# Altium footprint library PM.PcbLib: 38 footprints (part 1 of 3)
Each footprint in its own frame and in the unit in brackets; x right, y up, seen from the top. Pads: shape width x height; smd on the part's side, far side on the other; paste and mask are expansions set on the pad; w line width, h text height; cw(c..) or ccw(c..) is an arc to the next point about the centre after c.
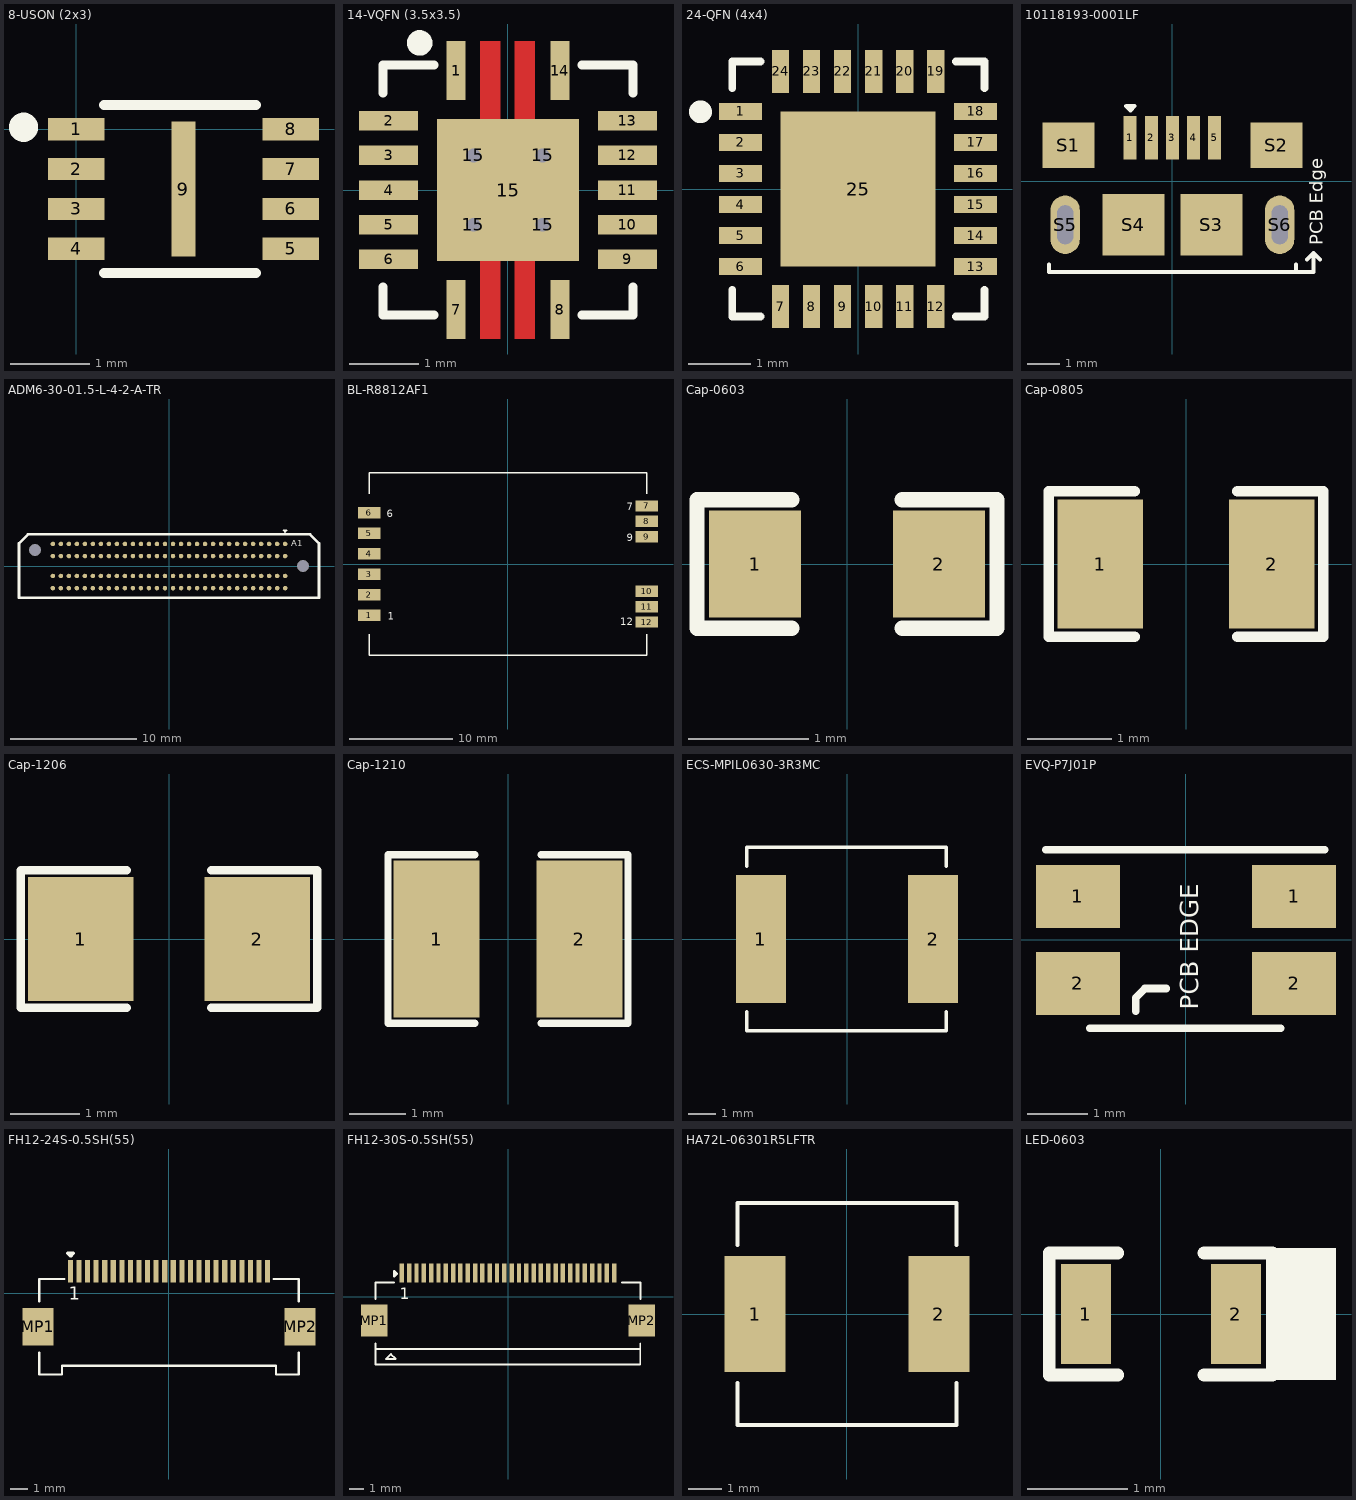
[diagram p0: the footprints below, top view; thin cyan lines are the x and y axes]

## 8-USON (2x3) [mm]
pads (9):
  rect 0.711x0.28 smd: 1(0,0) 2(0,-0.5) 3(0,-1) 4(0,-1.5) 5(2.695,-1.5) 6(2.695,-1) 7(2.695,-0.5) 8(2.695,0)
  rect 0.3x1.7 smd: 9(1.348,-0.75)
Top Overlay:
  circle w0.254: c-0.66,0.025 r0.057
  lines w0.127: 0.352,-1.805 2.257,-1.805 ; 0.352,0.305 2.257,0.305
3D body "step_temp.STEP": height 0.6, standoff 0, extent -0.152,-1.75 2.848,0.25

## 14-VQFN (3.5x3.5) [mm]
pads (19):
  rect 0.28x0.85 smd: 1(-0.75,1.725) 7(-0.75,-1.725) 8(0.75,-1.725) 14(0.75,1.725)
  rect 0.85x0.28 smd: 2(-1.725,1) 3(-1.725,0.5) 4(-1.725,0) 5(-1.725,-0.5) 6(-1.725,-1) 9(1.725,-1) 10(1.725,-0.5) 11(1.725,0) 12(1.725,0.5) 13(1.725,1)
  round 0.4 hole 0.2 mask+0: 15(-0.5,-0.5) 15(-0.5,0.5) 15(0.5,-0.5) 15(0.5,0.5)
  rect 2.05x2.05 smd: 15(0,0)
Top Layer:
  region: -0.11,0.949 -0.11,2.149 -0.403,2.149 -0.403,0.949
  region: 0.39,0.949 0.39,2.149 0.097,2.149 0.097,0.949
  region: -0.403,-0.949 -0.403,-2.149 -0.11,-2.149 -0.11,-0.949
  region: 0.097,-0.949 0.097,-2.149 0.39,-2.149 0.39,-0.949
Top Overlay:
  circle w0.254: c-1.275,2.124 r0.057
  lines w0.127: -1.803,-1.397 -1.803,-1.803 -1.067,-1.803 ; -1.803,1.397 -1.803,1.803 -1.067,1.803 ; 1.067,-1.803 1.803,-1.803 1.803,-1.397 ; 1.067,1.803 1.803,1.803 1.803,1.397
3D body "RHL0014A.stp": height 1, standoff 0, extent -1.75,-1.75 1.75,1.75

## 24-QFN (4x4) [mm]
pads (25):
  rect 0.69x0.28 smd: 1(-1.895,1.25) 2(-1.895,0.75) 3(-1.895,0.25) 4(-1.895,-0.25) 5(-1.895,-0.75) 6(-1.895,-1.25) 13(1.895,-1.25) 14(1.895,-0.75) 15(1.895,-0.25) 16(1.895,0.25) 17(1.895,0.75) 18(1.895,1.25)
  rect 0.28x0.69 smd: 7(-1.25,-1.895) 8(-0.75,-1.895) 9(-0.25,-1.895) 10(0.25,-1.895) 11(0.75,-1.895) 12(1.25,-1.895) 19(1.25,1.895) 20(0.75,1.895) 21(0.25,1.895) 22(-0.25,1.895) 23(-0.75,1.895) 24(-1.25,1.895)
  rect 2.5x2.5 smd: 25(0,0)
Top Overlay:
  circle w0.254: c-2.54,1.245 r0.057
  lines w0.127: -2.028,-1.626 -2.028,-2.057 -1.571,-2.057 ; -2.028,1.626 -2.028,2.057 -1.571,2.057 ; 1.579,-2.057 2.036,-2.057 2.036,-1.626 ; 1.579,2.057 2.036,2.057 2.036,1.626
3D body "CP2102N-A02-GQFN24R--3DModel-STEP-56544.STEP": height 0.8, standoff 0, extent -2,-2 2,2

## 10118193-0001LF [mm]
pads (11):
  rect 0.4x1.35 smd: 1(-1.3,1.338) 2(-0.65,1.338) 3(0,1.338) 4(0.65,1.338) 5(1.3,1.338)
  rect 1.6x1.4 smd: S1(-3.2,1.112) S2(3.2,1.112)
  rect 1.9x1.9 smd: S3(1.2,-1.338) S4(-1.2,-1.338)
  oval 0.9x1.8 hole 0.5 slot 1.2 at 90 deg: S5(-3.3,-1.338) S6(3.3,-1.338)
Top Overlay:
  lines w0.127: -3.8,-2.558 -3.8,-2.788 3.8,-2.788 ; 3.8,-2.558 3.8,-2.788 ; 4.142,-2.404 4.343,-2.203 ; 4.544,-2.404 4.343,-2.203 ; 3.8,-2.788 4.343,-2.788 4.343,-2.203 ; -1.422,2.311 -1.168,2.311 -1.295,2.184 -1.422,2.311
  text "PCB Edge" at 4.625,-1.973 h0.41
3D body "step_temp.STEP": height 2.78, standoff -0.82, extent -3.928,-4.166 3.928,1.495

## ADM6-30-01.5-L-4-2-A-TR [mm]
pads (122):
  round 0.356 smd: A01(9.207,1.75) A02(8.572,1.75) A03(7.938,1.75) A04(7.302,1.75) A05(6.667,1.75) A06(6.032,1.75) A07(5.397,1.75) A08(4.763,1.75) A09(4.127,1.75) A10(3.492,1.75) A11(2.857,1.75) A12(2.222,1.75) A13(1.587,1.75) A14(0.953,1.75) A15(0.318,1.75) A16(-0.318,1.75) A17(-0.953,1.75) A18(-1.587,1.75) A19(-2.222,1.75) A20(-2.857,1.75) A21(-3.492,1.75) A22(-4.127,1.75) A23(-4.763,1.75) A24(-5.397,1.75) A25(-6.032,1.75) A26(-6.667,1.75) A27(-7.302,1.75) A28(-7.938,1.75) A29(-8.572,1.75) A30(-9.207,1.75) B01(9.207,0.79) B02(8.572,0.79) B03(7.938,0.79) B04(7.302,0.79) B05(6.667,0.79) B06(6.032,0.79) B07(5.397,0.79) B08(4.763,0.79) B09(4.127,0.79) B10(3.492,0.79) B11(2.857,0.79) B12(2.222,0.79) B13(1.587,0.79) B14(0.953,0.79) B15(0.318,0.79) B16(-0.318,0.79) B17(-0.953,0.79) B18(-1.587,0.79) B19(-2.222,0.79) B20(-2.857,0.79) B21(-3.492,0.79) B22(-4.127,0.79) B23(-4.763,0.79) B24(-5.397,0.79) B25(-6.032,0.79) B26(-6.667,0.79) B27(-7.302,0.79) B28(-7.938,0.79) B29(-8.572,0.79) B30(-9.207,0.79) C01(9.207,-0.79) C02(8.572,-0.79) C03(7.938,-0.79) C04(7.302,-0.79) C05(6.667,-0.79) C06(6.032,-0.79) C07(5.397,-0.79) C08(4.763,-0.79) C09(4.127,-0.79) C10(3.492,-0.79) C11(2.857,-0.79) C12(2.222,-0.79) C13(1.587,-0.79) C14(0.953,-0.79) C15(0.318,-0.79) C16(-0.318,-0.79) C17(-0.953,-0.79) C18(-1.587,-0.79) C19(-2.222,-0.79) C20(-2.857,-0.79) C21(-3.492,-0.79) C22(-4.127,-0.79) C23(-4.763,-0.79) C24(-5.397,-0.79) C25(-6.032,-0.79) C26(-6.667,-0.79) C27(-7.302,-0.79) C28(-7.938,-0.79) C29(-8.572,-0.79) C30(-9.207,-0.79) D01(9.207,-1.75) D02(8.572,-1.75) D03(7.938,-1.75) D04(7.302,-1.75) D05(6.667,-1.75) D06(6.032,-1.75) D07(5.397,-1.75) D08(4.763,-1.75) D09(4.127,-1.75) D10(3.492,-1.75) D11(2.857,-1.75) D12(2.222,-1.75) D13(1.587,-1.75) D14(0.953,-1.75) D15(0.318,-1.75) D16(-0.318,-1.75) D17(-0.953,-1.75) D18(-1.587,-1.75) D19(-2.222,-1.75) D20(-2.857,-1.75) D21(-3.492,-1.75) D22(-4.127,-1.75) D23(-4.763,-1.75) D24(-5.397,-1.75) D25(-6.032,-1.75) D26(-6.667,-1.75) D27(-7.302,-1.75) D28(-7.938,-1.75) D29(-8.572,-1.75) D30(-9.207,-1.75)
  round 0 hole 0.95 unplated: ""(-10.61,1.27) ""(10.61,0)
Top Overlay:
  lines w0.127: 9.068,2.819 9.195,2.692 9.322,2.819 9.068,2.819
  lines w0.2: -11.885,-2.5 -11.885,1.793 -11.178,2.5 11.178,2.5 11.885,1.793 11.885,-2.5 -11.885,-2.5
  text "A1" at 9.677,1.575 h0.5
3D body "ADM6-30-01.5-L-4-2-A.step": height 4.1, standoff -0.67, extent -11.885,-2.489 11.885,2.511

## BL-R8812AF1 [mm]
pads (12):
  rect 2.2x1.1 smd: 1(-13.5,-5) 2(-13.5,-3) 3(-13.5,-1) 4(-13.5,1) 5(-13.5,3) 6(-13.5,5) 7(13.5,5.65) 8(13.5,4.15) 9(13.5,2.65) 10(13.5,-2.65) 11(13.5,-4.15) 12(13.5,-5.65)
Top Overlay:
  lines w0.127: -13.5,-6.846 -13.5,-8.9 13.5,-8.9 13.5,-6.846 ; -13.5,6.846 -13.5,8.9 13.5,8.9 13.5,6.846
  text "12" at 10.909,-5.962 h0.7
  text "9" at 11.57,2.236 h0.7
  text "7" at 11.57,5.236 h0.7
  text "6" at -11.798,4.568 h0.7
  text "1" at -11.697,-5.432 h0.7
3D body "BL-R8812AF1 RTL8812AU.STEP": height 2.09, standoff 0.03, extent -13.5,-8.91 13.5,8.89

## Cap-0603 [mil]
pads (2):
  rect 30x35 smd mask+2.36: 1(-30,0) 2(30,0)
Top Overlay:
  lines w5: -18,-21 -49,-21 -49,21 -18,21 ; 18,-21 49,-21 49,21 18,21
3D body "User Library-CAPC1608X09.step": height 34.25, standoff -1.18, extent -31.51,-15.75 31.49,15.74

## Cap-0805 [mil] "SMD 0805"
pads (2):
  rect 40x60 smd mask+2.76: 1(-40,0) 2(40,0)
Top Overlay:
  lines w5: -24,-34 -64,-34 -64,34 -24,34 ; 24,-34 64,-34 64,34 24,34
3D body "User Library-0805 SMD Capacitor.step": height 30, standoff -0.79, extent -39.36,-24.6 39.38,24.61

## Cap-1206 [mil] "SMD 1206"
pads (2):
  rect 60x70 smd: 1(-50,0) 2(50,0)
Top Overlay:
  lines w5: -24,-39 -84,-39 -84,39 -24,39 ; 24,-39 84,-39 84,39 24,39
3D body "User Library-1206 SMD Capacitor.step": height 39.45, standoff 0, extent -62.96,-31.46 63.03,31.53

## Cap-1210 [mil] "SMD 1210"
pads (2):
  rect 60x110 smd: 1(-50,0) 2(50,0)
Top Overlay:
  lines w5: -23,-59 -84,-59 -84,59 -23,59 ; 23,-59 84,-59 84,59 23,59
3D body "User Library-CAPC3225X10.step": height 39.37, standoff 0, extent -62.99,-49.21 63,49.22

## ECS-MPIL0630-3R3MC [mm]
pads (2):
  rect 1.8x4.6 smd: 1(-3.1,0) 2(3.1,0)
Top Overlay:
  lines w0.127: -3.605,-2.62 -3.605,-3.3 3.579,-3.3 3.579,-2.62 ; -3.605,2.62 -3.605,3.3 3.579,3.3 3.579,2.62
3D body "step_temp.STEP": height 3, standoff 0, extent -3.55,-3.3 3.55,3.3

## EVQ-P7J01P [mm]
pads (4):
  rect 1.4x1.05 smd: 1(-1.8,0.725) 1(1.8,0.725) 2(-1.8,-0.725) 2(1.8,-0.725)
Top Overlay:
  lines w0.127: -2.337,1.499 2.311,1.499 ; -1.6,-1.473 1.575,-1.473 ; -0.838,-1.194 -0.838,-0.965 -0.686,-0.813 -0.33,-0.813
  text "PCB EDGE" at 0.205,-1.17 h0.3
3D body "EVQ-P7J01P--3DModel-STEP-269445-2.step": height 1.35, standoff 0, extent -2.35,-2.1 2.35,1.45

## FH12-24S-0.5SH(55) [mm]
pads (26):
  rect 0.3x1.3 smd: 1(-5.75,1.3) 2(-5.25,1.3) 3(-4.75,1.3) 4(-4.25,1.3) 5(-3.75,1.3) 6(-3.25,1.3) 7(-2.75,1.3) 8(-2.25,1.3) 9(-1.75,1.3) 10(-1.25,1.3) 11(-0.75,1.3) 12(-0.25,1.3) 13(0.25,1.3) 14(0.75,1.3) 15(1.25,1.3) 16(1.75,1.3) 17(2.25,1.3) 18(2.75,1.3) 19(3.25,1.3) 20(3.75,1.3) 21(4.25,1.3) 22(4.75,1.3) 23(5.25,1.3) 24(5.75,1.3)
  rect 1.8x2.2 smd: MP1(-7.65,-1.95) MP2(7.65,-1.95)
Top Overlay:
  lines w0.127: -7.569,-3.443 -7.569,-4.738 -6.248,-4.738 -6.248,-4.216 6.248,-4.216 6.248,-4.738 7.569,-4.738 7.569,-3.443 ; -7.569,-0.457 -7.569,0.838 -6.096,0.838 ; 6.096,0.838 7.569,0.838 7.569,-0.457
  lines w0.2: -5.894,2.337 -5.589,2.337 -5.742,2.184 -5.894,2.337
  text "1" at -5.842,-0.356 h0.76
3D body "FH12-24S-0.5SH.stp": height 2.09, standoff -0.01, extent -8.05,-4.724 8.05,1.676

## FH12-30S-0.5SH(55) [mm]
pads (32):
  rect 0.3x1.3 smd paste-2: 1(-7.25,1.625) 2(-6.75,1.625) 3(-6.25,1.625) 4(-5.75,1.625) 5(-5.25,1.625) 6(-4.75,1.625) 7(-4.25,1.625) 8(-3.75,1.625) 9(-3.25,1.625) 10(-2.75,1.625) 11(-2.25,1.625) 12(-1.75,1.625) 13(-1.25,1.625) 14(-0.75,1.625) 15(-0.25,1.625) 16(0.25,1.625) 17(0.75,1.625) 18(1.25,1.625) 19(1.75,1.625) 20(2.25,1.625) 21(2.75,1.625) 22(3.25,1.625) 23(3.75,1.625) 24(4.25,1.625) 25(4.75,1.625) 26(5.25,1.625) 27(5.75,1.625) 28(6.25,1.625) 29(6.75,1.625) 30(7.25,1.625)
  rect 1.8x2.2 smd: MP1(-9.15,-1.625) MP2(9.15,-1.625)
Top Overlay:
  lines w0.127: -9.05,-3.183 -9.05,-3.577 ; -9.05,-0.148 -9.05,0.975 -7.772,0.975 ; 7.772,0.975 9.05,0.975 9.05,-0.148 ; 9.04,-3.183 9.04,-3.577 ; -9.05,-3.577 -9.05,-4.623 9.04,-4.623 9.04,-3.577 ; -9.05,-3.577 9.04,-3.577 ; -8.331,-4.242 -7.671,-4.242 -8.001,-3.912 -8.331,-4.242
  lines w0.2: -7.772,1.422 -7.62,1.575 -7.772,1.727 -7.772,1.422
  text "1" at -7.391,-0.178 h0.76
3D body "FH12-30S-0.5SH_55_.step": height 2.09, standoff -0.01, extent -9.55,-4.625 9.55,1.775

## HA72L-06301R5LFTR [mm]
pads (2):
  rect 1.85x3.5 smd: 1(-2.775,0) 2(2.775,0)
Top Overlay:
  lines w0.127: -3.3,-2.085 -3.3,-3.347 3.3,-3.347 3.3,-2.085 ; -3.3,2.085 -3.3,3.347 3.3,3.347 3.3,2.085
3D body "HA72L-06301R5LFTR.STEP": height 3.01, standoff 0, extent -3.55,-3.3 3.55,3.3

## LED-0603 [mm]
pads (2):
  rect 0.5x1 smd: 1(-0.75,0) 2(0.75,0)
Top Overlay:
  rectangle: 1.118,-0.66 1.753,0.66
  lines w0.127: -0.432,-0.61 -1.118,-0.61 -1.118,0.61 -0.432,0.61 ; 0.432,-0.61 1.118,-0.61 1.118,0.61 0.432,0.61
3D body "User Library-LED SMD0603.step": height 0.68, standoff 0, extent -0.825,-0.369 0.825,0.356